# Altium footprint library IC_SMD_DUAL.PcbLib: 184 footprints (part 10 of 12)
Each footprint in its own frame and in the unit in brackets; x right, y up, seen from the top. Pads: shape width x height; smd on the part's side, far side on the other; paste and mask are expansions set on the pad; w line width, h text height; cw(c..) or ccw(c..) is an arc to the next point about the centre after c.
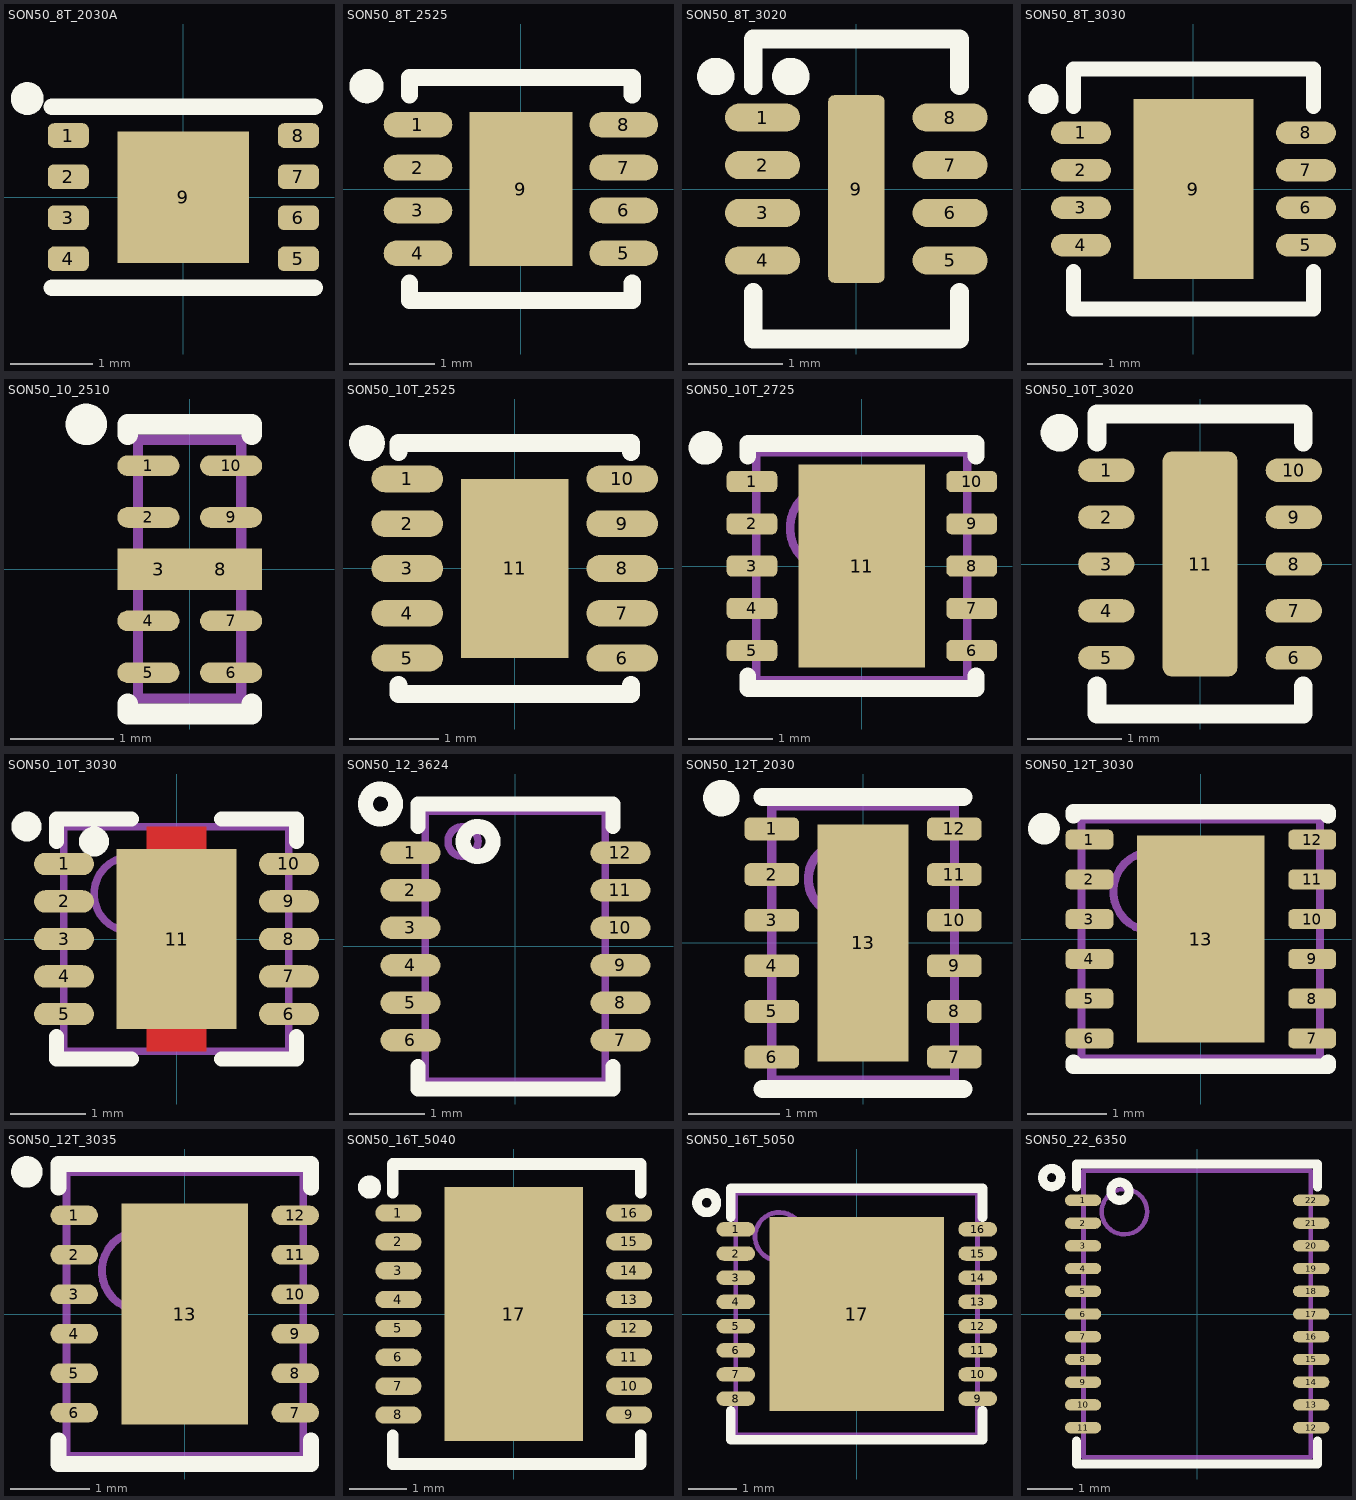
[diagram p9: the footprints below, top view; thin cyan lines are the x and y axes]

## SON50_8T_2030A [mm] "TDFN, UFDFPN8, Pitch: 0.5mm 2x3x0.8mm with Thermal pad"
height 0.8
pads (9):
  rrect50% 0.5x0.3 smd paste-0.05 mask+0.075: 1(-1.4,0.75) 2(-1.4,0.25) 3(-1.4,-0.25) 4(-1.4,-0.75) 5(1.4,-0.75) 6(1.4,-0.25) 7(1.4,0.25) 8(1.4,0.75)
  rect 1.6x1.6 smd paste-0.1 mask+0.075: 9(0,0)
Top Overlay:
  circle w0.2: c-1.9,1.2 r0.1
  lines w0.2: -1.6,-1.1 1.6,-1.1 ; -1.6,1.1 1.6,1.1
Top Designator:
  text ".Designator" at -3.898,-0.244 h1.52
3D body "User Library-TDFN-8-1.STEP": height 0.8, standoff 0, extent -1.5,-1 1.5,1

## SON50_8T_2525 [mm] "SON, 2.5X2.5X1mm, 0.5mm pitch"
height 1
pads (9):
  oval 0.8x0.3 smd paste-0.05 mask+0.05: 1(-1.2,0.75) 2(-1.2,0.25) 3(-1.2,-0.25) 4(-1.2,-0.75) 5(1.2,-0.75) 6(1.2,-0.25) 7(1.2,0.25) 8(1.2,0.75)
  rect 1.2x1.8 smd paste-0.1 mask+0.05: 9(0,0)
Top Overlay:
  circle w0.2: c-1.8,1.2 r0.1
  lines w0.2: -1.3,-1.1 -1.3,-1.3 1.3,-1.3 1.3,-1.1 ; -1.3,1.1 -1.3,1.3 1.3,1.3 1.3,1.1
Top Designator:
  text ".Designator" at -3.885,-0.344 h1.52
3D body "SHT31-ARP-B2.5kS.stp": height 1, standoff 0, extent -1.3,-1.25 1.3,1.25

## SON50_8T_3020 [mm] "SON8, CP-8-1 LFCSP_VD, 0.5mm pitch, 2X3X1mm"
height 0.8
pads (9):
  oval 0.8x0.3 smd paste-0.05 mask+0.075: 1(-1,0.762) 2(-1,0.254) 3(-1,-0.254) 4(-1,-0.762) 5(1,-0.762) 6(1,-0.254) 7(1,0.254) 8(1,0.762)
  rrect20% 0.6x2 smd paste-0.05: 9(0,0)
Top Overlay:
  circle w0.2: c-1.5,1.2 r0.1
  circle w0.2: c-0.7,1.2 r0.1
  lines w0.2: -1.1,-1.1 -1.1,-1.6 1.1,-1.6 1.1,-1.1 ; -1.1,1.1 -1.1,1.6 1.1,1.6 1.1,1.1
Top Designator:
  text ".Designator" at -3.823,-0.344 h1.52
3D body: height 0.8, standoff 0, extent -1,-1.5 1,1.5

## SON50_8T_3030 [mm] "WSON-8, DRG, LFCSP_WD, 3X3mm 0.5mm pitch with Thermal pad"
height 0.8
pads (9):
  oval 0.8x0.3 smd paste-0.05 mask+0.075: 1(-1.5,0.75) 2(-1.5,0.25) 3(-1.5,-0.25) 4(-1.5,-0.75) 5(1.5,-0.75) 6(1.5,-0.25) 7(1.5,0.25) 8(1.5,0.75)
  rect 1.6x2.4 smd paste-5 mask+0.075: 9(0,0)
Top Overlay:
  circle w0.2: c-2,1.2 r0.1
  lines w0.2: -1.6,-1.1 -1.6,-1.6 1.6,-1.6 1.6,-1.1 ; -1.6,1.1 -1.6,1.6 1.6,1.6 1.6,1.1
Top Paste:
  rectangle: -0.6,-1 0.6,-0.2
  rectangle: -0.6,0.2 0.6,1
Top Designator:
  text ".Designator" at -3.823,-0.344 h1.52
3D body: height 0.8, standoff 0.05, extent -1.5,-1.5 1.5,1.5
3D body: height 0.2, standoff 0, extent -1.55,0.625 -1.05,0.875
3D body: height 0.2, standoff 0, extent -1.55,0.125 -1.05,0.375
3D body: height 0.2, standoff 0, extent -1.55,-0.375 -1.05,-0.125
3D body: height 0.2, standoff 0, extent -1.55,-0.875 -1.05,-0.625
3D body: height 0.2, standoff 0, extent 1.05,-0.875 1.55,-0.625
3D body: height 0.2, standoff 0, extent 1.05,-0.375 1.55,-0.125
3D body: height 0.2, standoff 0, extent 1.05,0.125 1.55,0.375
3D body: height 0.2, standoff 0, extent 1.05,0.625 1.55,0.875
3D body: height 0.1, standoff 0, extent -0.7,-1.2 0.7,1.2

## SON50_10_2510 [mm] "DQA, USON, uDFN-10, MO-229 (JEDEC), SLP2510P8  - 2.5x1.0x0.5mm"
height 0.5
pads (10):
  oval 0.6x0.2 smd mask+0.05: 1(-0.4,1) 2(-0.4,0.5) 4(-0.4,-0.5) 5(-0.4,-1) 6(0.4,-1) 7(0.4,-0.5) 9(0.4,0.5) 10(0.4,1)
  rect 0.8x0.4 smd paste-2 mask+0.05: 3(-0.3,0) 8(0.3,0)
Top Overlay:
  circle w0.2: c-1,1.4 r0.1
  lines w0.2: -0.6,-1.3 -0.6,-1.4 0.6,-1.4 0.6,-1.3 ; -0.6,1.3 -0.6,1.4 0.6,1.4 0.6,1.3
Top Paste:
  rectangle: -0.65,-0.15 -0.15,0.15
  region: 0.65,0.15 0.15,0.15 0.15,-0.15 0.65,-0.15
Top Designator:
  text ".Designator" at -3.935,-0.294 h1.52
Mechanical 13:
  lines w0.1: -0.5,-1.25 0.5,-1.25 0.5,1.25 -0.5,1.25 -0.5,-1.25
3D body "User Library-UDFN10.STEP": height 0.55, standoff 0, extent -0.505,-1.25 0.505,1.25

## SON50_10T_2525 [mm] "DSK SON(TI), DFN2626-10, 2.5X2.5mm, Pitch: 0.5mm with thermal pad"
height 0.8
pads (11):
  oval 0.8x0.3 smd paste-0.05 mask+0.075: 1(-1.2,1) 2(-1.2,0.5) 3(-1.2,0) 4(-1.2,-0.5) 5(-1.2,-1) 6(1.2,-1) 7(1.2,-0.5) 8(1.2,0) 9(1.2,0.5) 10(1.2,1)
  rect 1.2x2 smd paste-5 mask+0.075: 11(0,0)
Top Overlay:
  circle w0.2: c-1.65,1.4 r0.1
  lines w0.2: -1.3,-1.3 -1.3,-1.4 1.3,-1.4 1.3,-1.3 ; -1.3,1.3 -1.3,1.4 1.3,1.4 1.3,1.3
Top Paste:
  rectangle: -0.4,-0.8 0.4,-0.2
  rectangle: -0.4,0.2 0.4,0.8
Top Designator:
  text ".Designator" at -3.798,-0.294 h1.52
3D body "SON127P600-8N.step": height 0.8, standoff 0, extent -1.251,-1.25 1.251,1.25

## SON50_10T_2725 [mm] "DFN(PLP)2527-10, 0.5mm pitch, 2.7x2.5x0.6mm"
height 0.6
pads (11):
  rrect50% 0.6x0.25 smd mask+0.075: 1(-1.3,1) 2(-1.3,0.5) 3(-1.3,0) 4(-1.3,-0.5) 5(-1.3,-1) 6(1.3,-1) 7(1.3,-0.5) 8(1.3,0) 9(1.3,0.5) 10(1.3,1)
  rect 1.5x2.4 smd paste-5 mask+0.075: 11(0,0)
Top Overlay:
  circle w0.2: c-1.85,1.4 r0.1
  lines w0.2: -1.35,-1.3 -1.35,-1.45 1.35,-1.45 1.35,-1.3 ; -1.35,1.3 -1.35,1.45 1.35,1.45 1.35,1.3
Top Paste:
  rectangle: -0.6,-1 0.6,-0.2
  rectangle: -0.6,0.2 0.6,1
Top Designator:
  text ".Designator" at -3.898,-0.319 h1.52
Mechanical 13:
  circle w0.1: c-0.35,0.45 r0.5
  lines w0.1: -1.25,-1.35 -1.25,1.35 1.25,1.35 1.25,-1.35 -1.25,-1.35
3D body "SON50_10T_2725.step": height 0.6, standoff 0, extent -1.251,-1.35 1.251,1.35

## SON50_10T_3020 [mm] "DQC, PWSON-N10, Pitch: 0.5mm, 2X3mm"
pads (11):
  oval 0.6x0.25 smd mask+0.07: 1(-1,1) 2(-1,0.5) 3(-1,0) 4(-1,-0.5) 5(-1,-1) 6(1,-1) 7(1,-0.5) 8(1,0) 9(1,0.5) 10(1,1)
  rrect25% 0.8x2.4 smd paste-5 mask+0.07: 11(0,0)
Top Overlay:
  circle w0.2: c-1.5,1.4 r0.1
  lines w0.2: -1.1,-1.3 -1.1,-1.6 1.1,-1.6 1.1,-1.3 ; -1.1,1.3 -1.1,1.6 1.1,1.6 1.1,1.3
Top Paste:
  rectangle: -0.3,0.2 0.3,1
  rectangle: -0.3,-1 0.3,-0.2
Top Designator:
  text ".Designator" at -3.875,-0.344 h1.52
3D body: height 0.8, standoff 0, extent -1,-1.5 1,1.5

## SON50_10T_3030 [mm] "DRC SON, 10 TDFN, 3X3mm, Pitch: 0.5mm with thermal pad"
height 0.8
pads (11):
  oval 0.8x0.3 smd paste-0.05 mask+0.075: 1(-1.5,1) 2(-1.5,0.5) 3(-1.5,0) 4(-1.5,-0.5) 5(-1.5,-1) 6(1.5,-1) 7(1.5,-0.5) 8(1.5,0) 9(1.5,0.5) 10(1.5,1)
  rect 1.6x2.4 smd paste-5 mask+0.1: 11(0,0)
Top Layer:
  rectangle: -0.4,-1.5 0.4,1.5
Top Overlay:
  circle w0.2: c-2,1.5 r0.1
  circle w0.2: c-1.1,1.3 r0.1
  lines w0.2: -1.6,-1.3 -1.6,-1.6 -0.6,-1.6 ; -1.6,1.3 -1.6,1.6 -0.6,1.6 ; 0.6,-1.6 1.6,-1.6 1.6,-1.3 ; 0.6,1.6 1.6,1.6 1.6,1.3
Top Paste:
  rectangle: -0.6,0.2 0.6,1
  rectangle: -0.6,-1 0.6,-0.2
Top Solder:
  rectangle: -0.5,-1.6 0.5,1.6
Top Designator:
  text ".Designator" at -3.823,-0.344 h1.52
Mechanical 13:
  circle w0.1: c-0.6,0.6 r0.5
  lines w0.1: -1.5,-1.5 1.5,-1.5 1.5,1.5 -1.5,1.5 -1.5,-1.5
3D body: height 0.8, standoff 0, extent -1.5,-1.5 1.5,1.5

## SON50_12_3624 [mm] "SOJ, 12-Leads, Body 3.6x2.4mm, Pitch 0.50mm"
height 1.2
pads (12):
  oval 0.8x0.3 smd: 1(-1.4,1.25) 2(-1.4,0.75) 3(-1.4,0.25) 4(-1.4,-0.25) 5(-1.4,-0.75) 6(-1.4,-1.25) 7(1.4,-1.25) 8(1.4,-0.75) 9(1.4,-0.25) 10(1.4,0.25) 11(1.4,0.75) 12(1.4,1.25)
Top Overlay:
  circle w0.2: c-1.8,1.9 r0.2
  circle w0.2: c-0.5,1.4 r0.2
  lines w0.2: -1.3,-1.6 -1.3,-1.9 1.3,-1.9 1.3,-1.6 ; -1.3,1.6 -1.3,1.9 1.3,1.9 1.3,1.6
Top Designator:
  text ".Designator" at -3.81,-0.244 h1.52
Mechanical 13:
  circle w0.1: c-0.7,1.4 r0.2
  lines w0.1: -1.2,-1.8 1.2,-1.8 1.2,1.8 -1.2,1.8 -1.2,-1.8
3D body: height 1.2, standoff 0, extent -1.2,-1.8 1.2,1.8

## SON50_12T_2030 [mm] "WSON, 12-Leads, DSS, Body 3X2mm, Pitch 0.50mm"
height 0.8
pads (13):
  rrect50% 0.6x0.25 smd mask+0.075: 1(-1,1.25) 2(-1,0.75) 3(-1,0.25) 4(-1,-0.25) 5(-1,-0.75) 6(-1,-1.25) 7(1,-1.25) 8(1,-0.75) 9(1,-0.25) 10(1,0.25) 11(1,0.75) 12(1,1.25)
  rect 1x2.6 smd paste-5 mask+0.075: 13(0,0)
Top Overlay:
  circle w0.2: c-1.552,1.587 r0.1
  lines w0.2: -1.1,-1.6 1.1,-1.6 ; -1.1,1.6 1.1,1.6
Top Paste:
  rectangle: -0.4,-1.1 0.4,-0.2
  rectangle: -0.4,0.2 0.4,1.1
Top Designator:
  text ".Designator" at -3.899,-0.3 h1.52
Mechanical 13:
  circle w0.1: c-0.2,0.7 r0.4
  lines w0.1: -1,-1.5 1,-1.5 1,1.5 -1,1.5 -1,-1.5
3D body "SON50_12T_2030.step": height 0.8, standoff 0, extent -1.001,-1.5 1.001,1.5

## SON50_12T_3030 [mm] "WSON-12, DRR, 0.5mm pitch, 3x3x0.8mm"
height 0.8
pads (13):
  rrect50% 0.6x0.25 smd mask+0.075: 1(-1.4,1.25) 2(-1.4,0.75) 3(-1.4,0.25) 4(-1.4,-0.25) 5(-1.4,-0.75) 6(-1.4,-1.25) 7(1.4,-1.25) 8(1.4,-0.75) 9(1.4,-0.25) 10(1.4,0.25) 11(1.4,0.75) 12(1.4,1.25)
  rect 1.6x2.6 smd paste-0.85 mask+0.075: 13(0,0)
Top Overlay:
  circle w0.2: c-1.972,1.387 r0.1
  lines w0.2: -1.6,-1.55 -1.6,-1.6 1.6,-1.6 1.6,-1.55 ; -1.6,1.55 -1.6,1.6 1.6,1.6 1.6,1.55
Top Paste:
  region: 0.7,-0.8 0.1,-0.8 0.1,-1.2 0.7,-1.2
  rectangle: -0.7,-1.2 -0.1,-0.8
  rectangle: -0.7,0.1 -0.1,0.6
  rectangle: -0.7,0.8 -0.1,1.2
  region: 0.7,1.2 0.1,1.2 0.1,0.8 0.7,0.8
  region: 0.7,0.6 0.1,0.6 0.1,0.1 0.7,0.1
  region: 0.7,-0.1 0.1,-0.1 0.1,-0.6 0.7,-0.6
  rectangle: -0.7,-0.6 -0.1,-0.1
Top Designator:
  text ".Designator" at -3.909,-0.344 h1.52
Mechanical 13:
  circle w0.1: c-0.6,0.6 r0.5
  lines w0.1: -1.5,-1.5 1.5,-1.5 1.5,1.5 -1.5,1.5 -1.5,-1.5
3D body "DRR0012D.stp": height 0.77, standoff 0, extent -1.5,-1.5 1.5,1.5

## SON50_12T_3035 [mm] "SON, DSON, DFN, pitch: 0.5mm, 3.5x3mm"
pads (13):
  oval 0.6x0.25 smd mask+0.075: 1(-1.4,1.25) 2(-1.4,0.75) 3(-1.4,0.25) 4(-1.4,-0.25) 5(-1.4,-0.75) 6(-1.4,-1.25) 7(1.4,-1.25) 8(1.4,-0.75) 9(1.4,-0.25) 10(1.4,0.25) 11(1.4,0.75) 12(1.4,1.25)
  rect 1.6x2.8 smd paste-2 mask+0.075: 13(0,0)
Top Overlay:
  circle w0.2: c-2,1.8 r0.1
  lines w0.2: -1.6,-1.6 -1.6,-1.9 1.6,-1.9 1.6,-1.6 ; -1.6,1.6 -1.6,1.9 1.6,1.9 1.6,1.6
Top Paste:
  rectangle: -0.7,-0.6 -0.1,-0.1
  rectangle: -0.7,-1.3 -0.1,-0.8
  region: 0.7,-0.8 0.1,-0.8 0.1,-1.3 0.7,-1.3
  region: 0.7,-0.1 0.1,-0.1 0.1,-0.6 0.7,-0.6
  region: 0.7,0.6 0.1,0.6 0.1,0.1 0.7,0.1
  region: 0.7,1.3 0.1,1.3 0.1,0.8 0.7,0.8
  rectangle: -0.7,0.8 -0.1,1.3
  rectangle: -0.7,0.1 -0.1,0.6
Top Designator:
  text ".Designator" at -3.923,-0.344 h1.52
Mechanical 13:
  circle w0.1: c-0.55,0.55 r0.5
  lines w0.1: -1.5,-1.8 1.5,-1.8 1.5,1.8 -1.5,1.8 -1.5,-1.8
3D body: height 1, standoff 0, extent -1.5,-1.8 1.5,1.8

## SON50_16T_5040 [mm] "DHD DFN-16, 5X4mm, 0.5mm pitch"
height 0.8
pads (17):
  oval 0.8x0.3 smd mask+0.05: 1(-2,1.75) 2(-2,1.25) 3(-2,0.75) 4(-2,0.25) 5(-2,-0.25) 6(-2,-0.75) 7(-2,-1.25) 8(-2,-1.75) 9(2,-1.75) 10(2,-1.25) 11(2,-0.75) 12(2,-0.25) 13(2,0.25) 14(2,0.75) 15(2,1.25) 16(2,1.75)
  rect 2.4x4.4 smd paste-3: 17(0,0)
Top Overlay:
  circle w0.2: c-2.5,2.2 r0.1
  lines w0.2: -2.1,-2.1 -2.1,-2.6 2.2,-2.6 2.2,-2.1 ; -2.1,2.1 -2.1,2.6 2.2,2.6 2.2,2.1
Top Paste:
  rectangle: -1,0.9 -0.2,1.9
  rectangle: 0.2,0.9 1,1.9
  rectangle: 0.2,-0.5 1,0.5
  rectangle: -1,-0.5 -0.2,0.5
  rectangle: 0.2,-1.9 1,-0.9
  rectangle: -1,-1.9 -0.2,-0.9
Top Designator:
  text ".Designator" at -3.835,-0.344 h1.52
3D body "DFN-16-5x4-0_5.STEP": height 0.8, standoff 0, extent -2.06,-2.55 2.06,2.55

## SON50_16T_5050 [mm] "WSON16, 5X5mm, 0.5mm pitch"
height 0.8
pads (17):
  oval 0.8x0.3 smd mask+0.05: 1(-2.5,1.75) 2(-2.5,1.25) 3(-2.5,0.75) 4(-2.5,0.25) 5(-2.5,-0.25) 6(-2.5,-0.75) 7(-2.5,-1.25) 8(-2.5,-1.75) 9(2.5,-1.75) 10(2.5,-1.25) 11(2.5,-0.75) 12(2.5,-0.25) 13(2.5,0.25) 14(2.5,0.75) 15(2.5,1.25) 16(2.5,1.75)
  rect 3.6x4 smd paste-3: 17(0,0)
Top Overlay:
  circle w0.2: c-3.1,2.3 r0.2
  lines w0.2: -2.6,-2 -2.6,-2.6 2.6,-2.6 2.6,-2 ; -2.6,2 -2.6,2.6 2.6,2.6 2.6,2
Top Paste:
  rectangle: -1.7,0.765 -0.7,1.895
  rectangle: -1.7,-0.565 -0.7,0.565
  rectangle: -1.7,-1.895 -0.7,-0.765
  rectangle: -0.5,0.765 0.5,1.895
  rectangle: -0.5,-0.565 0.5,0.565
  rectangle: -0.5,-1.895 0.5,-0.765
  rectangle: 0.7,0.765 1.7,1.895
  rectangle: 0.7,-0.565 1.7,0.565
  rectangle: 0.7,-1.895 1.7,-0.765
Top Designator:
  text ".Designator" at -3.935,-0.344 h1.52
Mechanical 13:
  circle w0.1: c-1.6,1.6 r0.5
  lines w0.1: -2.5,-2.5 -2.5,2.5 2.5,2.5 2.5,-2.5 -2.5,-2.5
3D body "SON50_16T.step": height 0.8, standoff 0, extent -2.501,-2.5 2.501,2.5

## SON50_22_6350 [mm] "SON-22, 0.5mm pitch, 5x6.3x1.3mm"
height 1.3
pads (22):
  oval 0.8x0.25 smd mask+0.075: 1(-2.51,2.5) 2(-2.51,2) 3(-2.51,1.5) 4(-2.51,1) 5(-2.51,0.5) 6(-2.51,0) 7(-2.51,-0.5) 8(-2.51,-1) 9(-2.51,-1.5) 10(-2.51,-2) 11(-2.51,-2.5) 12(2.51,-2.5) 13(2.51,-2) 14(2.51,-1.5) 15(2.51,-1) 16(2.51,-0.5) 17(2.51,0) 18(2.51,0.5) 19(2.51,1) 20(2.51,1.5) 21(2.51,2) 22(2.51,2.5)
Top Overlay:
  circle w0.2: c-1.7,2.7 r0.2
  circle w0.2: c-3.2,3 r0.2
  lines w0.2: -2.65,-2.8 -2.65,-3.3 2.65,-3.3 2.65,-2.8 ; -2.65,2.8 -2.65,3.3 2.65,3.3 2.65,2.8
Top Designator:
  text ".Designator" at -3.968,-0.344 h1.52
Mechanical 13:
  circle w0.1: c-1.6,2.25 r0.5
  lines w0.1: -2.5,-3.15 2.5,-3.15 2.5,3.15 -2.5,3.15 -2.5,-3.15
3D body "SON50_22_5063.step": height 1.3, standoff 0, extent -2.501,-3.15 2.501,3.15